# Altium schematic symbol library LM517701DCPR.SchLib: 1 symbol
Pins are listed as number, name and electrical type; pins without a type are passive.

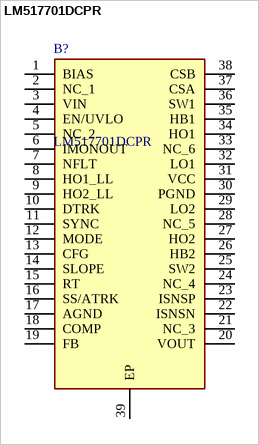
[diagram p0: symbol LM517701DCPR]

## LM517701DCPR
designator B?
Switching Controllers 78V wide-VIN bidirec tional 4-switch buc; Manufacturer_Name: Texas Instruments; Geometry.Height: 1.2mm; Mouser Part Number: *; Mouser Price/Stock: *; Manufacturer_Part_Number: LM517701DCPR; Datasheet Link: https://www.ti.com/lit/ds/symlink/lm51770.pdf?ts=1773625559046
footprint SOP50P640X120-39N
pins: 1 BIAS, 2 NC_1, 3 VIN, 4 EN/UVLO, 5 NC_2, 6 IMONOUT, 7 NFLT, 8 HO1_LL, 9 HO2_LL, 10 DTRK, 11 SYNC, 12 MODE, 13 CFG, 14 SLOPE, 15 RT, 16 SS/ATRK, 17 AGND, 18 COMP, 19 FB, 20 VOUT, 21 NC_3, 22 ISNSN, 23 ISNSP, 24 NC_4, 25 SW2, 26 HB2, 27 HO2, 28 NC_5, 29 LO2, 30 PGND, 31 VCC, 32 LO1, 33 NC_6, 34 HO1, 35 HB1, 36 SW1, 37 CSA, 38 CSB, 39 EP